# EAGLE library part BUS2 (library k1)
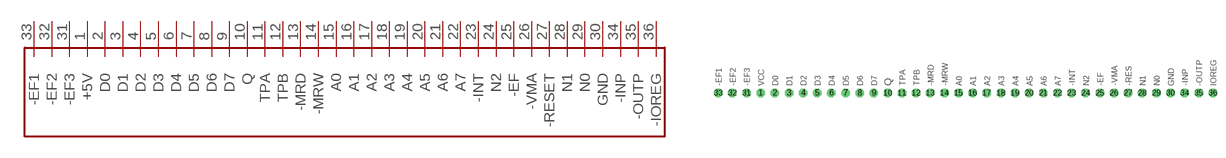
[diagram p4: symbol with the pads of BUS2; footprint BUS2]

Designator prefix -

## BUS2  [BUS2]
1  +5V  pwr
2  D0
3  D1
4  D2
5  D3
6  D4
7  D5
8  D6
9  D7
10  Q
11  TPA
12  TPB
13  -MRD
14  -MRW
15  A0
16  A1
17  A2
18  A3
19  A4
20  A5
21  A6
22  A7
23  -INT
24  N2
25  -EF
26  -VMA
27  -RESET
28  N1
29  N0
30  GND  sup
31  -EF3
32  -EF2
33  -EF1
34  -INP
35  -OUTP
36  -IOREG

## Footprint BUS2 (pad centres in mm)
drill 1.016 octagon: 1 -36.83,0; 2 -34.29,0; 3 -31.75,0; 4 -29.21,0; 5 -26.67,0; 6 -24.13,0; 7 -21.59,0; 8 -19.05,0; 9 -16.51,0; 10 -13.97,0; 11 -11.43,0; 12 -8.89,0; 13 -6.35,0; 14 -3.81,0; 15 -1.27,0; 16 1.27,0; 17 3.81,0; 18 6.35,0; 19 8.89,0; 20 11.43,0; 21 13.97,0; 22 16.51,0; 23 19.05,0; 24 21.59,0; 25 24.13,0; 26 26.67,0; 27 29.21,0; 28 31.75,0; 29 34.29,0; 30 36.83,0; 31 -39.37,0; 32 -41.91,0; 33 -44.45,0; 34 39.37,0; 35 41.91,0; 36 44.45,0